# EAGLE library part TLV9044IPWR (library TLV9044IPWR)
1.2-V ultra-low voltage, 350-kHz-power saving quad op amp for battery powered systems Source: Datasheet <https://www.ti.com/lit/ds/symlink/tlv9044.pdf?ts=1630832764270&ref_url=https%3A%2F%2Fwww.ti.com%2Fproduct%2FTLV9044%3FkeyMatch%3DTLV9044IPWR%26tisearch%3Dsearch-everything%26usecase%3DOPN>
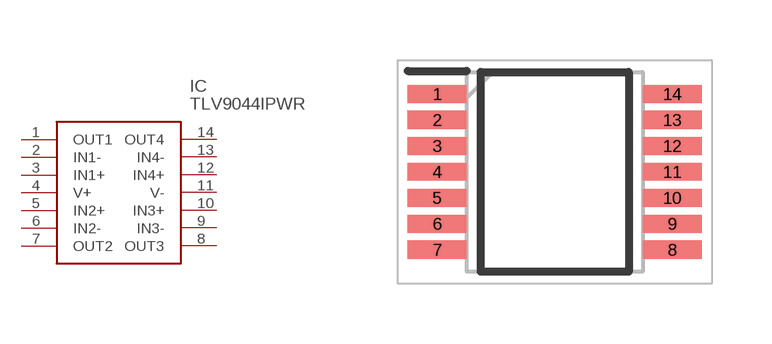
[diagram p0: symbol with the pads of SOP65P640X120-14N; footprint SOP65P640X120-14N]

Designator prefix IC

## TLV9044IPWR (Description: 1.2-V ultra-low voltage, 350-kHz-power saving quad op amp for battery powered systems; Height: 1.2mm; Manufacturer_Name: Texas Instruments; Manufacturer_Part_Number: TLV9044IPWR; Mouser_Part_Number: 595-TLV9044IPWR; Mouser_Price-Stock: https://www.mouser.co.uk/ProductDetail/Texas-Instruments/TLV9044IPWR?qs=eP2BKZSCXI4jXdLHrt%252BknA%3D%3D)  [SOP65P640X120-14N]
1  OUT1
2  IN1-
3  IN1+
4  V+
5  IN2+
6  IN2-
7  OUT2
8  OUT3
9  IN3-
10  IN3+
11  V-
12  IN4+
13  IN4-
14  OUT4

## Footprint SOP65P640X120-14N (pad centres in mm)
PW (R-PDSO-G14)
smd 1.475 x 0.45: 1 -2.938,1.95; 2 -2.938,1.3; 3 -2.938,0.65; 4 -2.938,0; 5 -2.938,-0.65; 6 -2.938,-1.3; 7 -2.938,-1.95; 8 2.938,-1.95; 9 2.938,-1.3; 10 2.938,-0.65; 11 2.938,0; 12 2.938,0.65; 13 2.938,1.3; 14 2.938,1.95